# Altium footprint library WE-RJ45 LAN.PcbLib: 101 footprints (part 7 of 7)
Each footprint in its own frame and in the unit in brackets; x right, y up, seen from the top. Pads: shape width x height; smd on the part's side, far side on the other; paste and mask are expansions set on the pad; w line width, h text height; cw(c..) or ccw(c..) is an arc to the next point about the centre after c.
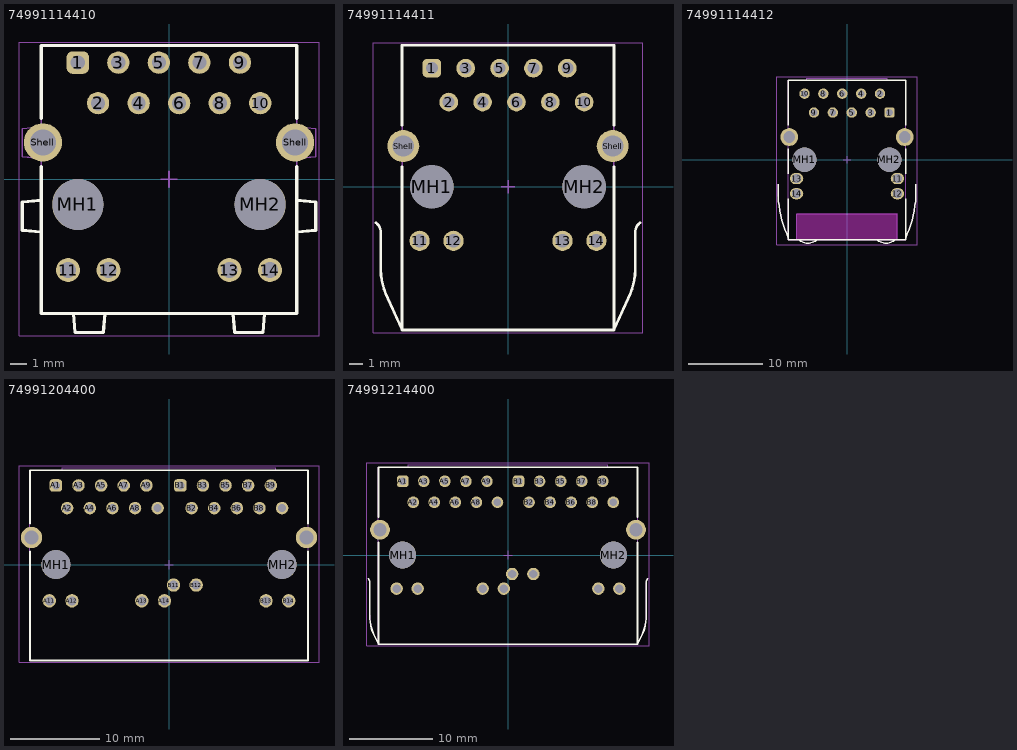
[diagram p6: the footprints below, top view; thin cyan lines are the x and y axes]

## 74991114410 [mm] "10/100/1000Base-T, THT, 1x1, Tab   vertical, with shield tabs, with LED L-R yellow-green/yellow-green, ETR"
height 16.9
pads (18):
  rrect50% 1.4x1.4 hole 0.89: 1(-5.715,7.32)
  round 1.4 hole 0.89: 2(-4.445,4.78) 3(-3.175,7.32) 4(-1.905,4.78) 5(-0.635,7.32) 6(0.635,4.78) 7(1.905,7.32) 8(3.175,4.78) 9(4.445,7.32) 10(5.715,4.78)
  round 1.5 hole 1.02: 11(-6.325,-5.68) 12(-3.785,-5.68) 13(3.785,-5.68) 14(6.325,-5.68)
  round 3.2 hole 3.2 unplated: MH1(-5.715,-1.57) MH2(5.715,-1.57)
  round 2.4 hole 1.63: Shell(-7.9,2.32) Shell(7.9,2.32)
Top Overlay:
  lines w0.2: -9.2,-3.185 -8,-3.29 ; -9.2,-3.18 -9.2,-1.42 ; -9.2,-1.415 -8,-1.31 ; -8,0.81 -8,-8.4 8,-8.4 8,0.81 ; -8,3.83 -8,8.4 8,8.4 8,3.83 ; -5.99,-8.4 -5.885,-9.6 ; -5.88,-9.6 -4.12,-9.6 ; -4.115,-9.6 -4.01,-8.4 ; 4.01,-8.4 4.115,-9.6 ; 4.12,-9.6 5.88,-9.6 ; 5.885,-9.6 5.99,-8.4 ; 8,-3.29 9.2,-3.185 ; 8,-1.31 9.2,-1.415 ; 9.2,-3.18 9.2,-1.42
Top Assembly:
  lines w0.1: -9.2,-3.185 -8,-3.29 ; -9.2,-3.18 -9.2,-1.42 ; -9.2,-1.415 -8,-1.31 ; -9.2,1.415 -8,1.31 ; -9.2,1.42 -9.2,3.18 ; -9.2,3.185 -8,3.29 ; -5.99,-8.4 -5.885,-9.6 ; -5.88,-9.6 -4.12,-9.6 ; -4.115,-9.6 -4.01,-8.4 ; 4.01,-8.4 4.115,-9.6 ; 4.12,-9.6 5.88,-9.6 ; 5.885,-9.6 5.99,-8.4 ; 8,-3.29 9.2,-3.185 ; 8,-1.31 9.2,-1.415 ; 8,1.31 9.2,1.415 ; 8,3.29 9.2,3.185 ; 9.2,-3.18 9.2,-1.42 ; 9.2,1.42 9.2,3.18 ; -8,-8.4 -8,8.4 8,8.4 8,-8.4 -8,-8.4
Top Designator:
  text ".Designator" at -3.647,-0.357 h1
Top 3D Body:
  lines w0.1: -9.2,-3.185 -8,-3.29 ; -9.2,-3.18 -9.2,-1.42 ; -9.2,-1.415 -8,-1.31 ; -9.2,1.415 -8,1.31 ; -9.2,1.42 -9.2,3.18 ; -9.2,3.185 -8,3.29 ; -5.99,-8.4 -5.885,-9.6 ; -5.88,-9.6 -4.12,-9.6 ; -4.115,-9.6 -4.01,-8.4 ; 4.01,-8.4 4.115,-9.6 ; 4.12,-9.6 5.88,-9.6 ; 5.885,-9.6 5.99,-8.4 ; 8,-3.29 9.2,-3.185 ; 8,-1.31 9.2,-1.415 ; 8,1.31 9.2,1.415 ; 8,3.29 9.2,3.185 ; 9.2,-3.18 9.2,-1.42 ; 9.2,1.42 9.2,3.18 ; -8,-8.4 8,-8.4 8,8.4 -8,8.4 -8,-8.4
Top Courtyard:
  lines w0.05: -9.4,-9.8 9.4,-9.8 9.4,8.6 -9.4,8.6 -9.4,-9.8
Top Component Center:
  lines w0.1: -0.5,0 0.5,0 ; 0,-0.5 0,0.5
3D body "74991114410.stp": height 16.95, standoff -3.45, extent -9.2,-9.599 9.2,8.4

## 74991114411 [mm] "Integrated RJ45 Transformer"
height 13.63
pads (18):
  rrect50% 1.4x1.4 hole 0.9: 1(-5.715,8.89)
  round 1.4 hole 0.9: 2(-4.445,6.35) 3(-3.175,8.89) 4(-1.905,6.35) 5(-0.635,8.89) 6(0.635,6.35) 7(1.905,8.89) 8(3.175,6.35) 9(4.445,8.89) 10(5.715,6.35)
  round 1.52 hole 1.02: 11(-6.63,-4.06) 12(-4.09,-4.06) 13(4.09,-4.06) 14(6.63,-4.06)
  round 3.25 hole 3.25 unplated: MH1(-5.715,0) MH2(5.715,0)
  round 2.4 hole 1.6: Shell(-7.855,3.05) Shell(7.855,3.05)
Top Overlay:
  lines w0.2: -9.895,-2.712 cw(c-10.397,-3.403) -9.544,-3.45 -9.544,-5.881 ccw(c-4.53,-6.12) -9.016,-8.373 -7.948,-10.749 -7.95,1.5 ; -7.95,-10.75 7.95,-10.75 ; -7.95,4.6 -7.95,10.6 7.95,10.6 7.95,4.6 ; 7.95,1.5 7.948,-10.749 9.016,-8.373 ccw(c4.53,-6.12) 9.544,-5.881 9.544,-3.45 cw(c10.397,-3.403) 9.895,-2.712
Top Assembly:
  lines w0.1: -9.895,-2.712 cw(c-10.397,-3.403) -9.544,-3.45 -9.544,-5.881 ccw(c-4.53,-6.12) -9.016,-8.373 -7.948,-10.749 ; 7.948,-10.749 9.016,-8.373 ccw(c4.53,-6.12) 9.544,-5.881 9.544,-3.45 cw(c10.397,-3.403) 9.895,-2.712 ; -7.95,-10.75 -7.95,10.6 7.95,10.6 7.95,-10.75 -7.95,-10.75
Top Designator:
  text ".Designator" at -3.647,-0.357 h1
Top 3D Body:
  lines w0.1: -9.895,-2.712 cw(c-10.397,-3.403) -9.544,-3.45 -9.544,-5.881 ccw(c-4.53,-6.12) -9.016,-8.373 -7.948,-10.749 ; 7.948,-10.749 9.016,-8.373 ccw(c4.53,-6.12) 9.544,-5.881 9.544,-3.45 cw(c10.397,-3.403) 9.895,-2.712 ; -7.95,-10.75 -7.95,10.6 7.95,10.6 7.95,-10.75 -7.95,-10.75
Top Courtyard:
  lines w0.05: -10.095,-10.95 10.095,-10.95 10.095,10.8 -10.095,10.8 -10.095,-10.95
Top Component Center:
  lines w0.1: -0.5,0 0.5,0 ; 0,-0.5 0,0.5
3D body "74991114411.stp": height 15.53, standoff -3.4, extent -9.933,-10.75 9.933,10.6

## 74991114412 [mm] "LAN Transformer"
height 13.8
pads (18):
  rrect50% 1.4x1.4 hole 0.9: 1(5.715,6.35)
  round 1.4 hole 0.9: 2(4.445,8.89) 3(3.175,6.35) 4(1.905,8.89) 5(0.635,6.35) 6(-0.635,8.89) 7(-1.905,6.35) 8(-3.175,8.89) 9(-4.445,6.35) 10(-5.715,8.89)
  oval 1.8x1.5 hole 1.2: 11(6.785,-2.54) 12(6.785,-4.57) 13(-6.785,-2.54) 14(-6.785,-4.57)
  round 3.25 hole 3.25 unplated: MH1(-5.715,0) MH2(5.715,0)
  round 2.4 hole 1.6: Shell(-7.77,3.05) Shell(7.77,3.05)
Top Layer keep-out:
  region: -6.785,-10.8 6.785,-10.8 6.785,-7.3 -6.785,-7.3
Top Overlay:
  lines w0.2: -9.275,-3.3 -9.261,-3.314 -9.261,-4.932 ccw(c5.455,-4.3) -7.877,-10.562 ; -7.875,-5.22 -7.875,-10.8 7.875,-10.8 7.875,-5.22 ; -7.875,-1.89 -7.875,1.49 ; -7.875,4.61 -7.875,10.7 7.875,10.7 7.875,4.61 ; -6.38,-10.807 ccw(c-5.255,-9.6) -4.134,-10.81 ; 4.134,-10.81 ccw(c5.255,-9.6) 6.38,-10.807 ; 7.875,-1.89 7.875,1.49 ; 7.877,-10.562 ccw(c-5.455,-4.3) 9.261,-4.932 9.261,-3.314 ; 9.261,-3.314 9.275,-3.3 9.261,-3.314
Assembly Notes:
  lines w0.1: -6.785,-10.8 6.785,-10.8 6.785,-7.3 -6.785,-7.3 -6.785,-10.8
  text "Keep-out area" at -3.974,-9.547 h1.5
Top Assembly:
  lines w0.1: -9.275,-3.3 -9.261,-3.314 -9.261,-4.932 ccw(c5.455,-4.3) -7.877,-10.562 ; -6.38,-10.807 ccw(c-5.255,-9.6) -4.134,-10.81 ; -5.4,10.7 -5.4,10.95 5.4,10.95 5.4,10.7 ; 4.134,-10.81 ccw(c5.255,-9.6) 6.38,-10.807 ; 7.877,-10.562 ccw(c-5.455,-4.3) 9.261,-4.932 9.261,-3.314 9.275,-3.3 ; -7.875,-10.8 -7.875,10.7 7.875,10.7 7.875,-10.8 -7.875,-10.8
Top Designator:
  text ".Designator" at -3.647,-0.357 h1
Top 3D Body:
  lines w0.1: -9.275,-3.3 -9.261,-3.314 -9.261,-4.932 ccw(c5.455,-4.3) -7.877,-10.562 ; -6.38,-10.807 ccw(c-5.255,-9.6) -4.134,-10.81 ; -5.4,10.7 -5.4,10.95 5.4,10.95 5.4,10.7 ; 4.134,-10.81 ccw(c5.255,-9.6) 6.38,-10.807 ; 7.877,-10.562 ccw(c-5.455,-4.3) 9.261,-4.932 9.261,-3.314 9.275,-3.3 ; -7.875,-10.8 -7.875,10.7 7.875,10.7 7.875,-10.8 -7.875,-10.8
Top Courtyard:
  lines w0.05: -9.475,-11.45 9.475,-11.45 9.475,11.15 -9.475,11.15 -9.475,-11.45
Top Component Center:
  lines w0.1: -0.5,0 0.5,0 ; 0,-0.5 0,0.5
3D body "74991114412.stp": height 15.35, standoff -3.4, extent -9.275,-11.25 9.275,10.95

## 74991204400 [mm] "RJ45 LAN Transformer"
height 13.63
pads (32):
  rrect50% 1.4x1.4 hole 0.9: A1(-12.7,8.89) B1(1.27,8.89)
  round 1.4 hole 0.9: A2(-11.43,6.35) A3(-10.16,8.89) A4(-8.89,6.35) A5(-7.62,8.89) A6(-6.35,6.35) A7(-5.08,8.89) A8(-3.81,6.35) A9(-2.54,8.89) A10(-1.27,6.35) B2(2.54,6.35) B3(3.81,8.89) B4(5.08,6.35) B5(6.35,8.89) B6(7.62,6.35) B7(8.89,8.89) B8(10.16,6.35) B9(11.43,8.89) B10(12.7,6.35)
  round 1.5 hole 1.02: A11(-13.43,-4.06) A12(-10.89,-4.06) A13(-3.05,-4.06) A14(-0.51,-4.06) B11(0.51,-2.29) B12(3.05,-2.29) B13(10.89,-4.06) B14(13.43,-4.06)
  round 3.25 hole 3.25 unplated: MH1(-12.7,0) MH2(12.7,0)
  round 2.4 hole 1.6: Shell(-15.44,3.05) Shell(15.44,3.05)
Top Overlay:
  lines w0.2: -15.62,1.5 -15.62,-10.75 15.62,-10.75 15.62,1.5 ; -15.62,4.6 -15.62,10.6 15.62,10.6 15.62,4.6
Top Assembly:
  lines w0.1: -12,10.6 -12,10.9 12,10.9 12,10.6 ; -15.62,-10.75 15.62,-10.75 15.62,10.6 -15.62,10.6 -15.62,-10.75
Top Designator:
  text ".Designator" at -3.647,-0.357 h1
Top 3D Body:
  lines w0.1: -12,10.6 -12,10.9 12,10.9 12,10.6 ; -15.62,-10.75 15.62,-10.75 15.62,10.6 -15.62,10.6 -15.62,-10.75
Top Courtyard:
  lines w0.05: -16.84,-10.95 16.84,-10.95 16.84,11.1 -16.84,11.1 -16.84,-10.95
Top Component Center:
  lines w0.1: -0.5,0 0.5,0 ; 0,-0.5 0,0.5
3D body "74991204400.stp": height 13.82, standoff -3.41, extent -15.62,-10.75 15.62,10.9

## 74991214400 [mm] "Integrated RJ45 Transformer"
height 13.63
pads (32):
  rrect50% 1.4x1.4 hole 0.9: A1(-12.7,8.89) B1(1.27,8.89)
  round 1.4 hole 0.9: A2(-11.43,6.35) A3(-10.16,8.89) A4(-8.89,6.35) A5(-7.62,8.89) A6(-6.35,6.35) A7(-5.08,8.89) A8(-3.81,6.35) A9(-2.54,8.89) A10(-1.27,6.35) B2(2.54,6.35) B3(3.81,8.89) B4(5.08,6.35) B5(6.35,8.89) B6(7.62,6.35) B7(8.89,8.89) B8(10.16,6.35) B9(11.43,8.89) B10(12.7,6.35)
  round 1.5 hole 1.02: A11(-13.43,-4.06) A12(-10.89,-4.06) A13(-3.05,-4.06) A14(-0.51,-4.06) B11(0.51,-2.29) B12(3.05,-2.29) B13(10.89,-4.06) B14(13.43,-4.06)
  round 3.25 hole 3.25 unplated: MH1(-12.7,0) MH2(12.7,0)
  round 2.4 hole 1.6: Shell(-15.44,3.05) Shell(15.44,3.05)
Top Overlay:
  lines w0.2: -16.838,-2.852 cw(c-17.38,-3.31) -16.67,-3.32 -16.67,-7.27 ccw(c-10.67,-7.27) -15.622,-10.658 ; -15.62,1.55 -15.62,-10.75 15.62,-10.75 15.62,1.55 ; -15.62,4.55 -15.62,10.6 15.62,10.6 15.62,4.55 ; 15.622,-10.658 ccw(c10.67,-7.27) 16.67,-7.27 16.67,-3.32 cw(c17.38,-3.31) 16.838,-2.852
Top Assembly:
  lines w0.1: -16.838,-2.852 cw(c-17.38,-3.31) -16.67,-3.32 -16.67,-7.27 ccw(c-10.67,-7.27) -15.622,-10.658 ; -12,10.6 -12,10.9 12,10.9 12,10.6 ; 15.622,-10.658 ccw(c10.67,-7.27) 16.67,-7.27 16.67,-3.32 cw(c17.38,-3.31) 16.838,-2.852 ; -15.62,-10.75 15.62,-10.75 15.62,10.6 -15.62,10.6 -15.62,-10.75
Top Designator:
  text ".Designator" at -3.647,-0.357 h1
Top 3D Body:
  lines w0.1: -16.838,-2.852 cw(c-17.38,-3.31) -16.67,-3.32 -16.67,-7.27 ccw(c-10.67,-7.27) -15.622,-10.658 ; -12,10.6 -12,10.9 12,10.9 12,10.6 ; 15.622,-10.658 ccw(c10.67,-7.27) 16.67,-7.27 16.67,-3.32 cw(c17.38,-3.31) 16.838,-2.852 ; -15.62,-10.75 15.62,-10.75 15.62,10.6 -15.62,10.6 -15.62,-10.75
Top Courtyard:
  lines w0.05: -17.038,-10.95 -17.038,11.1 17.038,11.1 17.038,-10.95 -17.038,-10.95
Top Component Center:
  lines w0.1: -0.5,0 0.5,0 ; 0,-0.5 0,0.5
3D body "74991214400.stp": height 15.04, standoff -3.41, extent -16.843,-10.75 16.843,10.9